# Altium integrated library 8-1437565-1.IntLib: 1 symbol
Pins are listed as number, name and electrical type; pins without a type are passive.

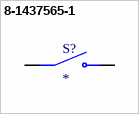
[diagram p0: symbol 8-1437565-1]

## 8-1437565-1
designator S?
Switch Tactile OFF (ON) SPST Round Button Gull Wing 0.05A 24VDC 1.57N SMD T/R; MF: TE Connectivity; MP: 8-1437565-1; SnapEDA_Link: https://www.snapeda.com/parts/8-1437565-1/TE+Connectivity+Alcoswitch+Switches/view-part/?ref=snap; Package: None; Value: *; Check_prices: https://www.snapeda.com/parts/8-1437565-1/TE+Connectivity+Alcoswitch+Switches/view-part/?ref=eda
footprint SW_8-1437565-1
pins: 1 COM, 2 COM, 3 NO, 4 NO